# Altium schematic symbol library VAOL-S8SB4.SchLib: 1 symbol
Pins are listed as number, name and electrical type; pins without a type are passive.

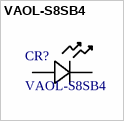
[diagram p0: symbol VAOL-S8SB4]

## VAOL-S8SB4
designator CR?
No Description Available; Manufacturer_Name: VCC; Copyright: Copyright (C) 2026 Ultra Librarian. All rights reserved.; Manufacturer_Part_Number: VAOL-S8SB4
footprint LED_VCCLITE_0805_VCC
pins: 1, 2